# EAGLE library part MAX9860ETG__MAX9860ETG+ (library HA_FONA_LARA_20)
Audio Codec 1ADC / 2DAC 16-Bit 24-Pin TQFN EP
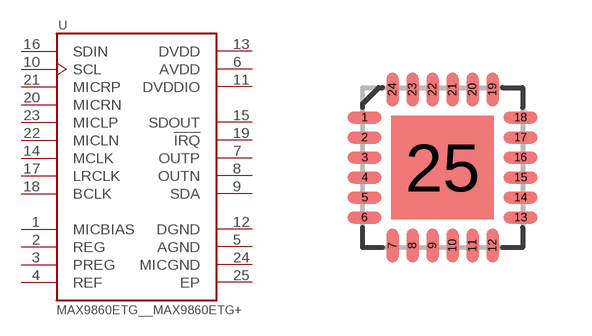
[diagram p4: symbol with the pads of MAX9860ETG__QFN50P400X400X75-25N; footprint MAX9860ETG__QFN50P400X400X75-25N]

Designator prefix U

## MAX9860ETG__MAX9860ETG+ (AVAILABILITY: Unavailable; DESCRIPTION: Audio Interface 16 b Serial 24-TQFN (4x4); MF: Maxim Integrated; MP: MAX9860ETG+; PACKAGE: TQFN-24 Maxim; PRICE: None)  [MAX9860ETG__QFN50P400X400X75-25N]
1  MICBIAS  pas
2  REG  pas
3  PREG  pas
4  REF  pas
5  AGND  pwr
6  AVDD  pwr
7  OUTP  out
8  OUTN  out
9  SDA  out
10  SCL  in
11  DVDDIO  pwr
12  DGND  pwr
13  DVDD  pwr
14  MCLK  in
15  SDOUT  out
16  SDIN  in
17  LRCLK
18  BCLK
19  !IRQ  out
20  MICRN  in
21  MICRP  in
22  MICLN  in
23  MICLP  in
24  MICGND  pwr
25  EP  pwr

## Footprint MAX9860ETG__QFN50P400X400X75-25N (pad centres in mm)
smd 0.85 x 0.3: 1 -1.95,1.25; 2 -1.95,0.75; 3 -1.95,0.25; 4 -1.95,-0.25; 5 -1.95,-0.75; 6 -1.95,-1.25; 13 1.95,-1.25; 14 1.95,-0.75; 15 1.95,-0.25; 16 1.95,0.25; 17 1.95,0.75; 18 1.95,1.25
smd 0.3 x 0.85: 7 -1.25,-1.95; 8 -0.75,-1.95; 9 -0.25,-1.95; 10 0.25,-1.95; 11 0.75,-1.95; 12 1.25,-1.95; 19 1.25,1.95; 20 0.75,1.95; 21 0.25,1.95; 22 -0.25,1.95; 23 -0.75,1.95; 24 -1.25,1.95
smd 2.6 x 2.6: 25 0,0